# Altium footprint library CAZN_M12-S4A-GPL_M12.PcbLib: 1 footprints
Each footprint in its own frame and in the unit in brackets; x right, y up, seen from the top. Pads: shape width x height; smd on the part's side, far side on the other; paste and mask are expansions set on the pad; w line width, h text height; cw(c..) or ccw(c..) is an arc to the next point about the centre after c.
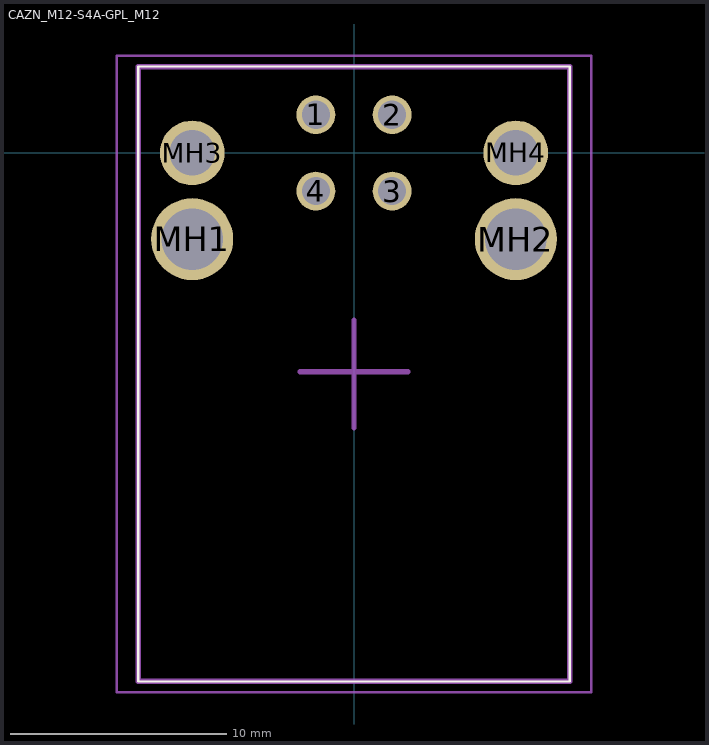
[diagram p0: the footprint, top view; thin cyan lines are the x and y axes]

## CAZN_M12-S4A-GPL_M12 [mm]
pads (8):
  round 1.8 hole 1.3: 1(-1.768,1.768) 2(1.768,1.768) 3(1.768,-1.768) 4(-1.768,-1.768)
  round 3.8 hole 2.85: MH1(-7.5,-4) MH2(7.5,-4)
  round 3 hole 2.1: MH3(-7.5,0) MH4(7.5,0)
Top Overlay:
  lines w0.1: -10,-24.5 10,-24.5 10,4 -10,4 -10,-24.5
Top Assembly:
  lines w0.254: -10,-24.5 -10,4 10,4 10,-24.5 -10,-24.5
Top Courtyard:
  lines w0.1: -11,-25 -11,4.5 11,4.5 11,-25 -11,-25
Top Designator:
  text ".Designator" at 13.5,-19.998 h1.5
Top Component Center:
  lines w0.254: -2.5,-10.15 2.5,-10.15 ; 0,-12.75 0,-7.75
3D body "M12A-04PFFR-SF7003.stp": height 16.5, standoff -2.7, extent -9.7,-23.48 9.5,3.3